# Altium footprint library CoilcraftPCB.PcbLib: 320 footprints (part 4 of 20)
Each footprint in its own frame and in the unit in brackets; x right, y up, seen from the top. Pads: shape width x height; smd on the part's side, far side on the other; paste and mask are expansions set on the pad; w line width, h text height; cw(c..) or ccw(c..) is an arc to the next point about the centre after c.
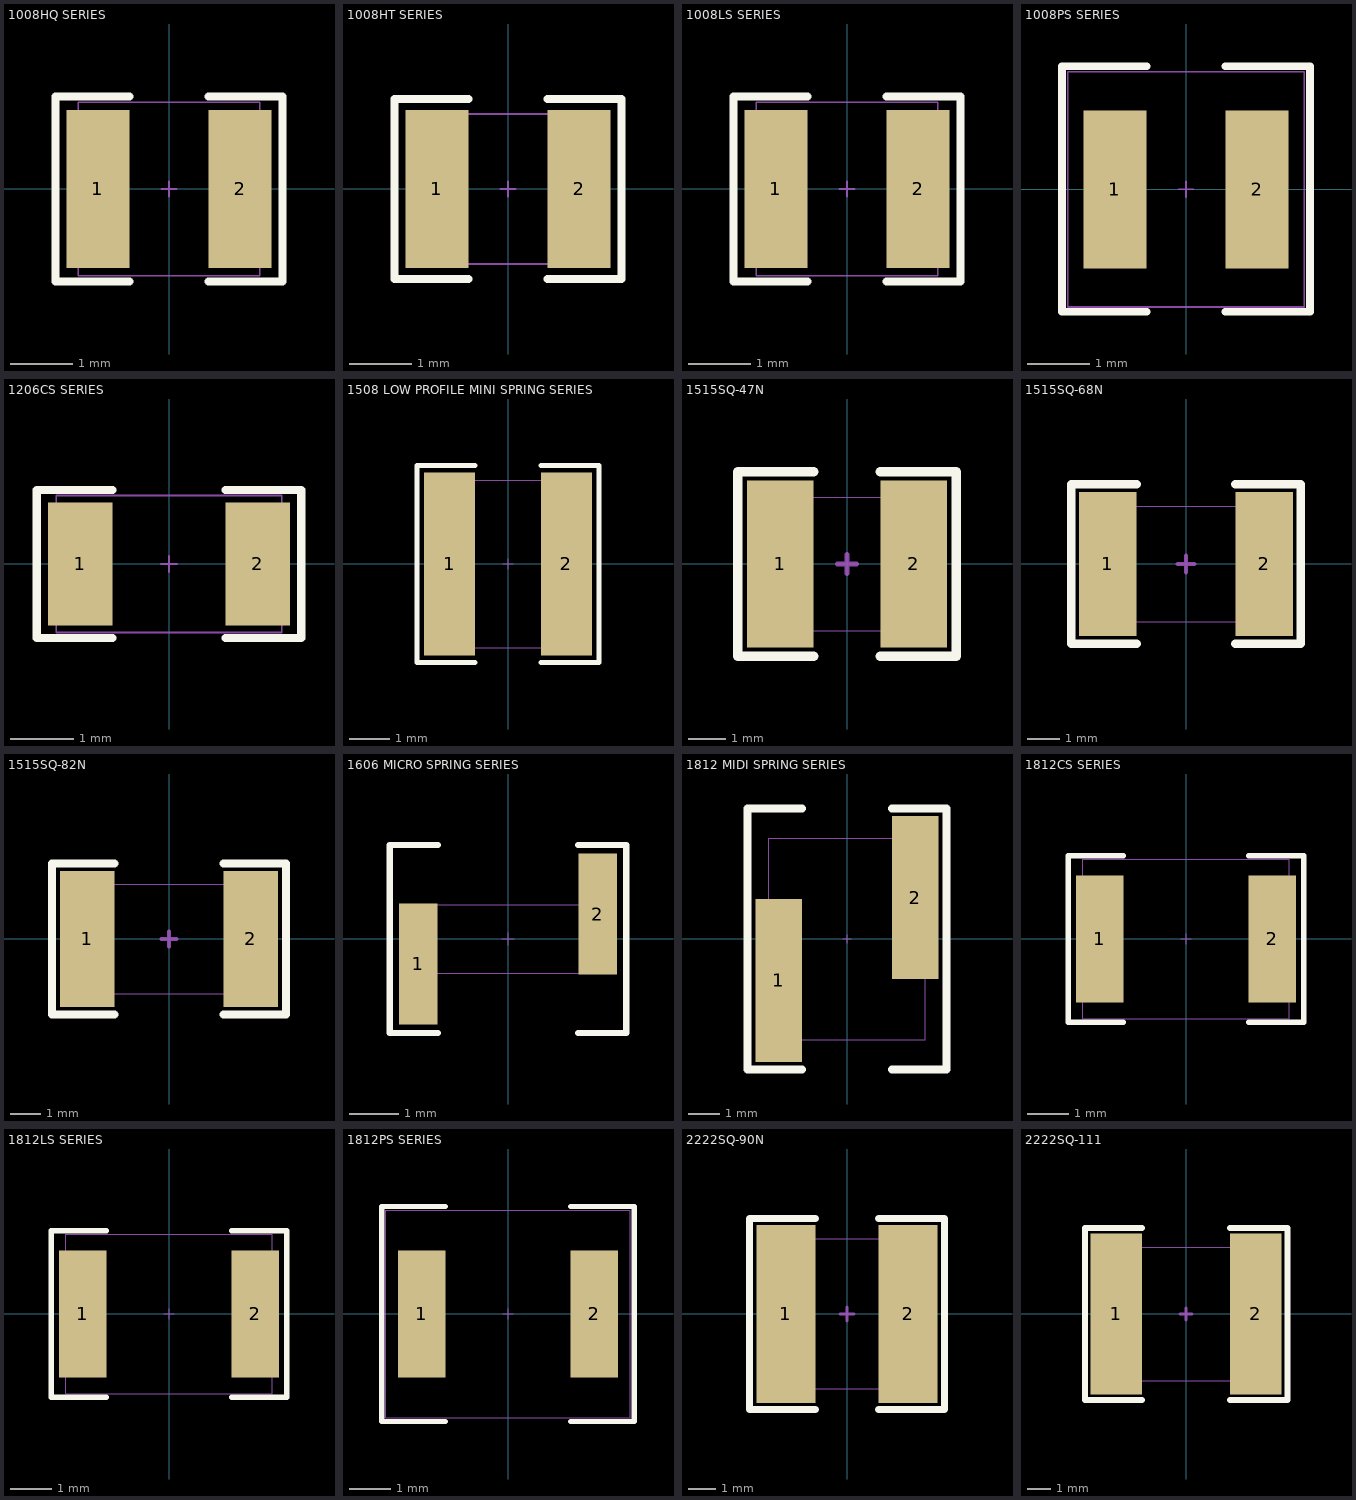
[diagram p3: the footprints below, top view; thin cyan lines are the x and y axes]

## 1008HQ SERIES [mil] "Coilcraft Chip Inductor"
height 80
pads (2):
  rect 40x100 smd: 1(-45,0) 2(45,0)
Top Overlay:
  lines w5: -25,-58.5 -72,-58.5 -72,58.5 -25,58.5 ; 25,-58.5 72,-58.5 72,58.5 25,58.5
Mechanical 13:
  lines w1: -5,0 5,0 ; 0,-5 0,5
Mechanical 14:
  lines w1: -57.5,-55 57.5,-55 57.5,55 -57.5,55 -57.5,-55
3D body: height 79.53, standoff -0.39, extent -57.48,-54.92 57.48,54.92

## 1008HT SERIES [mil] "Coilcraft Chip Inductor"
height 45
pads (2):
  rect 40x100 smd: 1(-45,0) 2(45,0)
Top Overlay:
  lines w5: -25,-57 -72,-57 -72,57 -25,57 ; 25,-57 72,-57 72,57 25,57
Mechanical 13:
  lines w1: -5,0 5,0 ; 0,-5 0,5
Mechanical 14:
  lines w1: -52.5,-47.5 52.5,-47.5 52.5,47.5 -52.5,47.5 -52.5,-47.5
3D body: height 44.53, standoff -0.39, extent -52.96,-45.86 52.95,45.87

## 1008LS SERIES [mil] "Coilcraft Chip Inductor"
height 80
pads (2):
  rect 40x100 smd: 1(-45,0) 2(45,0)
Top Overlay:
  lines w5: -25,-58.5 -72,-58.5 -72,58.5 -25,58.5 ; 25,-58.5 72,-58.5 72,58.5 25,58.5
Mechanical 13:
  lines w1: -5,0 5,0 ; 0,-5 0,5
Mechanical 14:
  lines w1: -57.5,-55 57.5,-55 57.5,55 -57.5,55 -57.5,-55
3D body: height 79.53, standoff -0.39, extent -57.48,-54.92 57.48,54.92

## 1008PS SERIES [mil] "Coilcraft Chip Inductor"
height 108
pads (2):
  rect 40x100 smd: 1(-45,0) 2(45,0)
Top Overlay:
  lines w5: -25,-77.5 -78.5,-77.5 -78.5,78 -25,78 ; 25,-77.5 78.5,-77.5 78.5,78 25,78
Mechanical 13:
  lines w1: -5,0 5,0 ; 0,-5 0,5
Mechanical 14:
  lines w1: -75,-74.5 75,-74.5 75,74.5 -75,74.5 -75,-74.5
3D body: height 107.87, standoff -0.39, extent -75,-74.41 75,74.41

## 1206CS SERIES [mil] "Coilcraft Chip Inductor"
height 60
pads (2):
  rect 40x76 smd: 1(-55,0) 2(55,0)
Top Overlay:
  lines w5: -35,-46 -82,-46 -82,46 -35,46 ; 35,-46 82,-46 82,46 35,46
Mechanical 13:
  lines w1: -5,0 5,0 ; 0,-5 0,5
Mechanical 14:
  lines w1: -70,-42.5 -70,42.5 70,42.5 70,-42.5 -70,-42.5
3D body: height 59.45, standoff -0.39, extent -70.08,-42.52 70.08,42.52

## 1508 LOW PROFILE MINI SPRING SERIES [mil] "Coilcraft Low Profile Square Air Coil Inductor"
height 79
pads (2):
  rect 50x180 smd: 1(-57.5,0) 2(57.5,0)
Top Overlay:
  lines w5: -32.5,-97 -89.5,-97 -89.5,97 -32.5,97 ; 32.5,-97 89.5,-97 89.5,97 32.5,97
Mechanical 13:
  lines w1: -5,0 5,0 ; 0,-5 0,5
Mechanical 14:
  lines w1: -77.5,-82.5 77.5,-82.5 77.5,82.5 -77.5,82.5 -77.5,-82.5
3D body: height 75.85, standoff -0.15, extent -68.65,-72.5 68.65,72.5

## 1515SQ-47N [mil] "Coilcraft Square Air Coil Inductor"
height 147
pads (2):
  rect 70x175 smd: 1(-70,0) 2(70,0)
Top Overlay:
  lines w10: -35,-97 -114.5,-97 -114.5,97 -35,97 ; 35,-97 114.5,-97 114.5,97 35,97
Mechanical 13:
  lines w5: -10,0 10,0 ; 0,-10 0,10
Mechanical 14:
  lines w1: -80,-70 80,-70 80,70 -80,70 -80,-70
3D body: height 153.6, standoff 0.1, extent -85,-73.59 85,73

## 1515SQ-68N [mil] "Coilcraft Square Air Coil Inductor"
height 147
pads (2):
  rect 70x175 smd: 1(-95,0) 2(95,0)
Top Overlay:
  lines w10: -60,-97 -139.5,-97 -139.5,97 -60,97 ; 60,-97 139.5,-97 139.5,97 60,97
Mechanical 13:
  lines w5: -10,0 10,0 ; 0,-10 0,10
Mechanical 14:
  lines w1: -105,-70 -105,70 105,70 105,-70 -105,-70
3D body: height 153.85, standoff 0.85, extent -110.17,-73.03 110.17,74

## 1515SQ-82N [mil] "Coilcraft Square Air Coil Inductor"
height 147
pads (2):
  rect 70x175 smd: 1(-105,0) 2(105,0)
Top Overlay:
  lines w10: -70,-97 -150,-97 -150,97 -70,97 ; 70,-97 150,-97 150,97 70,97
Mechanical 13:
  lines w5: -10,0 10,0 ; 0,-10 0,10
Mechanical 14:
  lines w1: -115,-70 115,-70 115,70 -115,70 -115,-70
3D body: height 153.6, standoff 1.1, extent -120.15,-73.54 120.15,73

## 1606 MICRO SPRING SERIES [mil] "Micro Spring Air Core Inductor"
height 62
pads (2):
  rect 31x97 smd: 1(-72,-20) 2(72,20)
Top Overlay:
  lines w5: -56.5,-75.5 -95,-75.5 -95,75.5 -56.5,75.5 ; 56.5,-75.5 95,-75.5 95,75.5 56.5,75.5
Mechanical 13:
  lines w1: -5,0 5,0 ; 0,-5 0,5
Mechanical 14:
  lines w1: -82.5,-27.5 -82.5,27.5 82.5,27.5 82.5,-27.5 -82.5,-27.5
3D body: height 54, standoff 0, extent -86.54,-62.5 86.54,62.5

## 1812 MIDI SPRING SERIES [mil] "Midi Spring Air Core Inductor"
height 165
pads (2):
  rect 58x203 smd: 1(-85,-51.5) 2(85,51.5)
Top Overlay:
  lines w10: -56,-162.5 -123.5,-162.5 -123.5,162.5 -56,162.5 ; 56,-162.5 123.5,-162.5 123.5,162.5 56,162.5
Mechanical 13:
  lines w1: -5,0 5,0 ; 0,-5 0,5
Mechanical 14:
  lines w1: -97.5,-125 -97.5,125 97.5,125 97.5,-125 -97.5,-125
3D body: height 150, standoff 0, extent -93.89,-103.5 93.89,101.5

## 1812CS SERIES [mil] "Coilcraft Chip Inductor"
height 135
pads (2):
  rect 45x120 smd: 1(-81.5,0) 2(81.5,0)
Top Overlay:
  lines w5: -59,-78.5 -111,-78.5 -111,78.5 -59,78.5 ; 59,-78.5 111,-78.5 111,78.5 59,78.5
Mechanical 13:
  lines w1: -5,0 5,0 ; 0,-5 0,5
Mechanical 14:
  lines w1: -97.5,-75 -97.5,75 97.5,75 97.5,-75 -97.5,-75
3D body: height 134.65, standoff -0.39, extent -97.44,-75 97.44,75

## 1812LS SERIES [mil] "Coilcraft Chip Inductor"
height 135
pads (2):
  rect 45x120 smd: 1(-81.5,0) 2(81.5,0)
Top Overlay:
  lines w5: -59,-78.5 -111,-78.5 -111,78.5 -59,78.5 ; 59,-78.5 111,-78.5 111,78.5 59,78.5
Mechanical 13:
  lines w1: -5,0 5,0 ; 0,-5 0,5
Mechanical 14:
  lines w1: -97.5,-75 97.5,-75 97.5,75 -97.5,75 -97.5,-75
3D body: height 134.65, standoff -0.39, extent -97.44,-75 97.44,75

## 1812PS SERIES [mil] "Coilcraft Chip Inductor"
height 150
pads (2):
  rect 45x120 smd: 1(-81.5,0) 2(81.5,0)
Top Overlay:
  lines w5: -59,-101.5 -119,-101.5 -119,101.5 -59,101.5 ; 59,-101.5 119,-101.5 119,101.5 59,101.5
Mechanical 13:
  lines w1: -5,0 5,0 ; 0,-5 0,5
Mechanical 14:
  lines w1: -115.5,-98 115.5,-98 115.5,98 -115.5,98 -115.5,-98
3D body: height 149.45, standoff -0.39, extent -115.36,-98.03 115.35,98.04

## 2222SQ-90N [mil] "Coilcraft Square Air Coil Inductor"
height 224
pads (2):
  rect 85x255 smd: 1(-87.5,0) 2(87.5,0)
Top Overlay:
  lines w10: -45,-137 -139.5,-137 -139.5,137 -45,137 ; 45,-137 139.5,-137 139.5,137 45,137
Mechanical 13:
  lines w5: -10,0 10,0 ; 0,-10 0,10
Mechanical 14:
  lines w1: -102.5,-107.5 -102.5,107.5 102.5,107.5 102.5,-107.5 -102.5,-107.5
3D body: height 224, standoff 0, extent -102.5,-107.5 102.5,107.5

## 2222SQ-111 [mil] "Coilcraft Square Air Coil Inductor"
height 224
pads (2):
  rect 85x265 smd: 1(-115,0) 2(115,0)
Top Overlay:
  lines w10: -72.5,-142 -167,-142 -167,142 -72.5,142 ; 72.5,-142 167.5,-142 167.5,142 72.51,142
Mechanical 13:
  lines w5: -10,0 10,0 ; 0,-10 0,10
Mechanical 14:
  lines w1: -125,-110 125,-110 125,110 -125,110 -125,-110
3D body: height 224, standoff 0, extent -125,-110 125,110